# Altium schematic symbol library 397730004.SchLib: 1 symbol
Pins are listed as number, name and electrical type; pins without a type are passive.

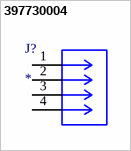
[diagram p0: symbol 397730004]

## 397730004
designator J?
4 Position Wire to Board Terminal Block Horizontal with Board 0.100 (2.54mm) Through Hole; MF: Molex; MP: 397730004; SnapEDA_Link: https://www.snapeda.com/parts/397730004/Molex/view-part/?ref=snap; Package: None; Value: *; Check_prices: https://www.snapeda.com/parts/397730004/Molex/view-part/?ref=eda
footprint CONN_SD-39773-001_04P_MOL
pins: 1, 2, 3, 4